# Altium integrated library USB Type-C 16 Pin.IntLib: 1 symbol
Pins are listed as number, name and electrical type; pins without a type are passive.

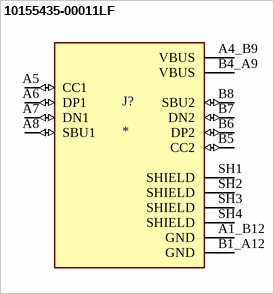
[diagram p0: symbol 10155435-00011LF]

## 10155435-00011LF
designator J?
MP: 10155435-00011LF; Package: None; Price: None; Value: *; Availability: Unavailable
footprint AMPHENOL_10155435-00011LF
pins: A1_B12 GND (power), A4_B9 VBUS (power), A5 CC1 (io), A6 DP1 (io), A7 DN1 (io), A8 SBU1 (io), B1_A12 GND (power), B4_A9 VBUS (power), B5 CC2 (io), B6 DP2 (io), B7 DN2 (io), B8 SBU2 (io), SH1 SHIELD, SH2 SHIELD, SH3 SHIELD, SH4 SHIELD